# Altium footprint library WR-SMA.PcbLib: 59 footprints (part 2 of 4)
Each footprint in its own frame and in the unit in brackets; x right, y up, seen from the top. Pads: shape width x height; smd on the part's side, far side on the other; paste and mask are expansions set on the pad; w line width, h text height; cw(c..) or ccw(c..) is an arc to the next point about the centre after c.
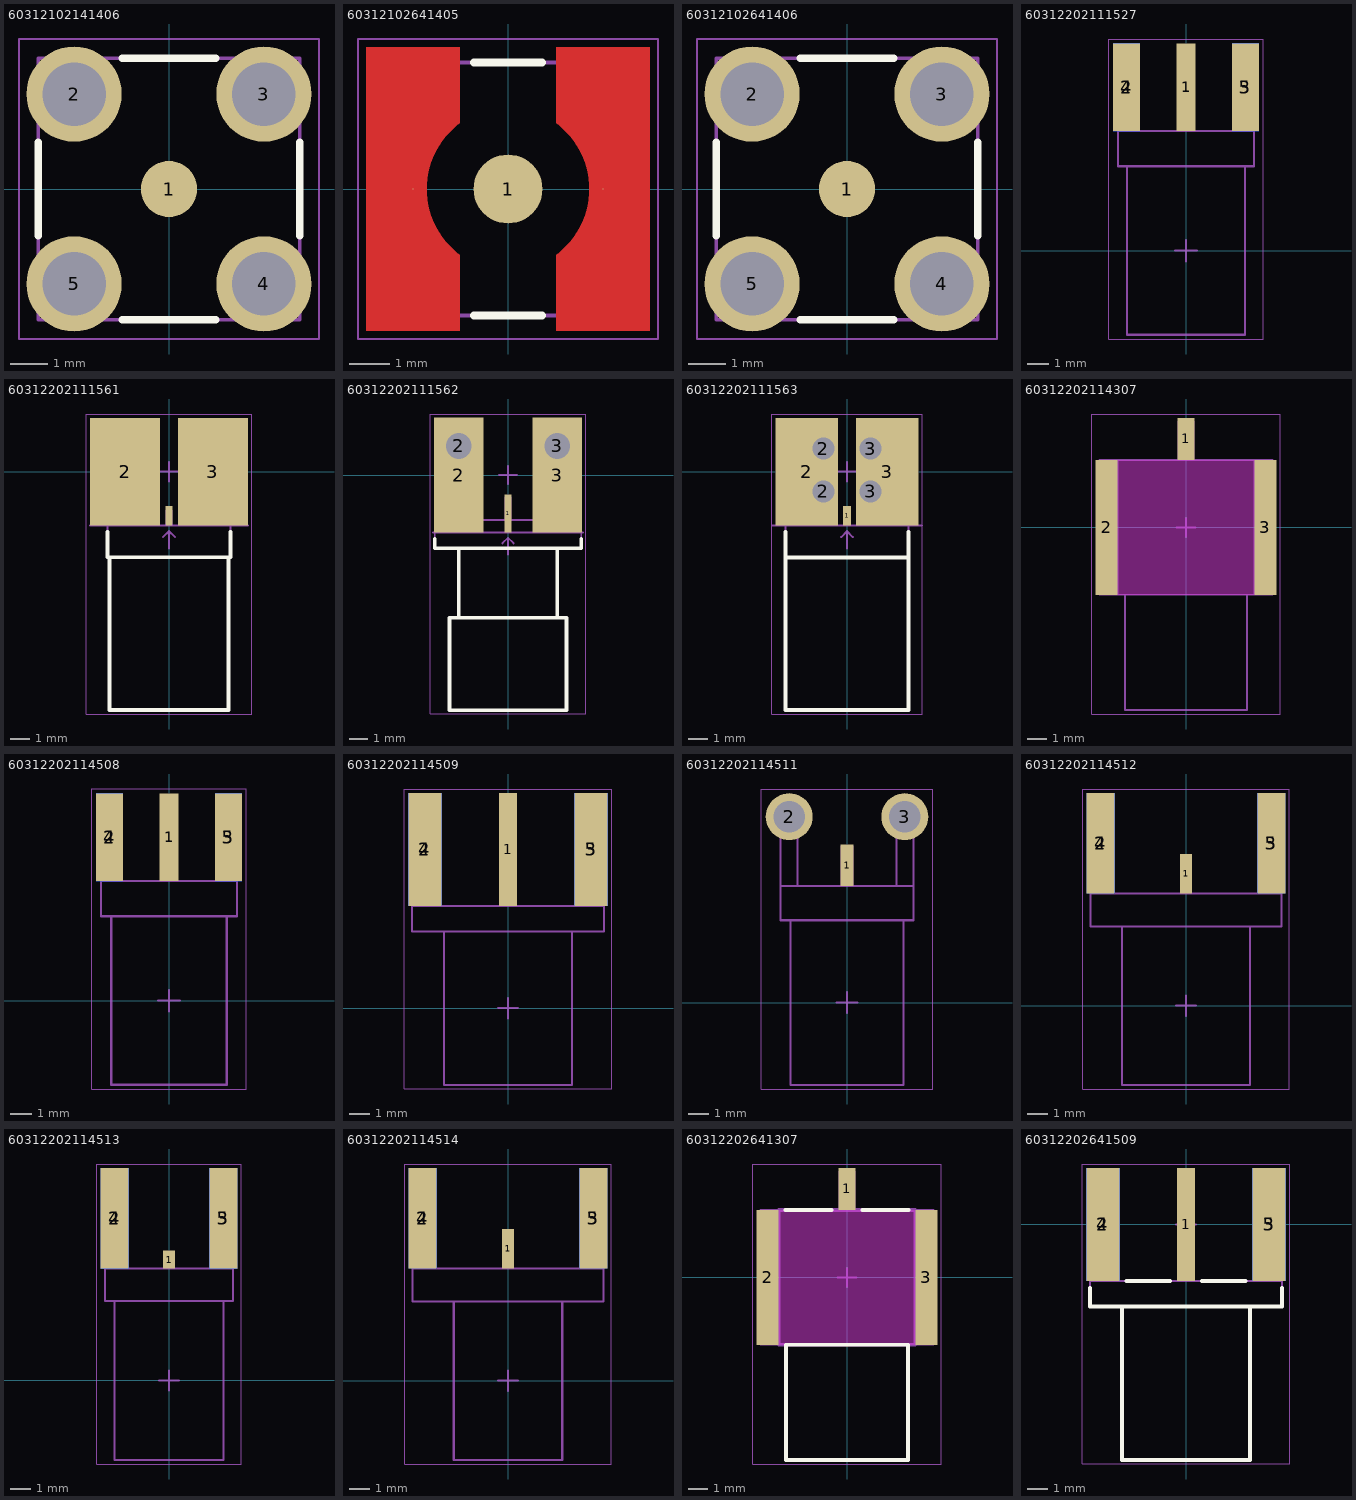
[diagram p1: the footprints below, top view; thin cyan lines are the x and y axes]

## 60312102141406 [mm] "SMA PCB SMT Jack Straight with  THT Grounding Pins"
height 9.56
pads (5):
  round 1.5 smd: 1(0,0)
  round 2.55 hole 1.7: 2(-2.54,2.54) 3(2.54,2.54) 4(2.54,-2.54) 5(-2.54,-2.54)
Top Overlay:
  lines w0.2: -3.5,-1.25 -3.5,1.25 ; -1.25,-3.5 1.25,-3.5 ; -1.25,3.5 1.25,3.5 ; 3.5,-1.25 3.5,1.25
Top Assembly:
  lines w0.1: -3.5,-3.5 -3.5,3.5 3.5,3.5 3.5,-3.5 -3.5,-3.5
Top Designator:
  text ".Designator" at -3.647,-0.357 h1
Top 3D Body:
  lines w0.1: -3.5,-3.5 -3.5,3.5 3.5,3.5 3.5,-3.5 -3.5,-3.5
Top Courtyard:
  lines w0.05: -4.015,-4.015 4.015,-4.015 4.015,4.015 -4.015,4.015 -4.015,-4.015
Top Component Center:
  lines w0.1: -0.5,0 0.5,0 ; 0,-0.5 0,0.5
3D body "60312102141406.stp": height 9.66, standoff -1.8, extent -3.433,-3.5 3.567,3.5

## 60312102641405 [mm] "SMA PCB SMT Jack Straight"
height 8.84
pads (3):
  round 1.73 smd: 1(0,0)
  round 0.025 smd: 2(-2.38,0) 3(2.38,0)
Top Layer:
  region: -3.555,-3.555 -3.555,3.555 -1.205,3.555 -1.205,1.652 -1.281,1.594 -1.425,1.466 -1.557,1.326 -1.674,1.174 -1.777,1.011 -1.865,0.84 -1.935,0.661 -1.989,0.476 -2.025,0.288 -2.043,0.096 -2.043,-0.096 -2.025,-0.288 -1.989,-0.476 -1.935,-0.661 -1.865,-0.84 -1.777,-1.011 -1.674,-1.174 -1.557,-1.326 -1.425,-1.466 -1.281,-1.594 -1.205,-1.652 -1.205,-3.555
  region: 3.555,-3.555 3.555,3.555 1.205,3.555 1.205,1.652 1.281,1.594 1.425,1.466 1.557,1.326 1.674,1.174 1.777,1.011 1.865,0.84 1.935,0.661 1.989,0.476 2.025,0.288 2.043,0.096 2.043,-0.096 2.025,-0.288 1.989,-0.476 1.935,-0.661 1.865,-0.84 1.777,-1.011 1.674,-1.174 1.557,-1.326 1.425,-1.466 1.281,-1.594 1.205,-1.652 1.205,-3.555
Top Overlay:
  lines w0.2: -0.85,-3.175 0.85,-3.175 ; -0.85,3.175 0.85,3.175
Top Assembly:
  lines w0.1: -3.175,-3.175 -3.175,3.175 3.175,3.175 3.175,-3.175 -3.175,-3.175
Top Designator:
  text ".Designator" at -3.647,-0.357 h1
Top 3D Body:
  lines w0.1: -3.175,-3.175 -3.175,3.175 3.175,3.175 3.175,-3.175 -3.175,-3.175
Top Courtyard:
  lines w0.05: -3.755,-3.76 -3.755,3.76 3.755,3.76 3.755,-3.76 -3.755,-3.76
Top Component Center:
  lines w0.1: -0.5,0 0.5,0 ; 0,-0.5 0,0.5
3D body "60312102641405.stp": height 8.89, standoff 0.05, extent -3.175,-3.175 3.175,3.175

## 60312102641406 [mm] "SMA PCB SMT Jack Straight with  THT Grounding Pins"
height 9.56
pads (5):
  round 1.5 smd: 1(0,0)
  round 2.55 hole 1.7: 2(-2.54,2.54) 3(2.54,2.54) 4(2.54,-2.54) 5(-2.54,-2.54)
Top Overlay:
  lines w0.2: -3.5,-1.25 -3.5,1.25 ; -1.25,-3.5 1.25,-3.5 ; -1.25,3.5 1.25,3.5 ; 3.5,-1.25 3.5,1.25
Top Assembly:
  lines w0.1: -3.5,-3.5 3.5,-3.5 3.5,3.5 -3.5,3.5 -3.5,-3.5
Top Designator:
  text ".Designator" at -3.647,-0.357 h1
Top 3D Body:
  lines w0.1: -3.5,-3.5 3.5,-3.5 3.5,3.5 -3.5,3.5 -3.5,-3.5
Top Courtyard:
  lines w0.05: -4.015,-4.015 -4.015,4.015 4.015,4.015 4.015,-4.015 -4.015,-4.015
Top Component Center:
  lines w0.1: -0.5,0 0.5,0 ; 0,-0.5 0,0.5
3D body "60312102641406.stp": height 9.61, standoff -1.85, extent -3.433,-3.5 3.567,3.5

## 60312202111527 [mm] "SMA PCB End Launch  Jack"
height 3.175
pads (5):
  rect 0.9x4.1 smd: 1(0,7.635)
  rect 1.25x4.1 smd: 2(-2.775,7.635) 3(2.775,7.635)
  rect 1.25x4.1 smd far side: 4(-2.775,7.635) 5(2.775,7.635)
Assembly Notes:
  lines w0.1: -3.175,5.585 3.175,5.585
  text "PCB END" at -2.2,4.335 h0.76
Top Assembly:
  lines w0.1: -2.75,3.935 -2.75,-3.935 2.75,-3.935 2.75,3.935 ; -3.175,3.935 -3.175,9.395 -2.365,9.395 -2.365,5.585 -0.38,5.585 -0.38,9.395 0.38,9.395 0.38,5.585 2.365,5.585 2.365,9.395 3.175,9.395 3.175,3.935 -3.175,3.935
Top Designator:
  text ".Designator" at -3.647,-0.357 h1
Top Courtyard:
  lines w0.05: -3.6,-4.135 -3.6,9.885 3.6,9.885 3.6,-4.135 -3.6,-4.135
Top Component Center:
  lines w0.1: -0.5,0 0.5,0 ; 0,-0.5 0,0.5
3D body "60312202111527.stp": height 3.55, standoff -2.8, extent -3.175,-3.935 3.175,9.395

## 60312202111561 [mm] "SMA Edgecard Mount Jack"
height 6.35
pads (3):
  rect 0.35x1 smd: 1(0,-2.27)
  rect 3.61x5.54 smd: 2(-2.26,0) 3(2.26,0)
Top Overlay:
  lines w0.2: -3.175,-3.1 -3.175,-4.42 3.175,-4.42 3.175,-3.1 ; -3.068,-4.42 -3.068,-12.3 3.068,-12.3 3.068,-4.42
Assembly Notes:
  lines w0.1: -4.065,-2.77 4.065,-2.77 ; -0.3,-3.37 0,-3.07 ; 0,-3.97 0,-3.07 ; 0.3,-3.37 0,-3.07
  text "PCB End" at -2.952,-5.07 h1
Top Assembly:
  lines w0.1: -3.175,-2.77 3.175,-2.77 ; -3.068,-4.42 -3.068,-12.3 3.068,-12.3 3.068,-4.42 ; -0.635,-2.77 -0.635,1.78 -3.175,1.78 -3.175,-4.42 3.175,-4.42 3.175,1.78 0.635,1.78 0.635,-2.77 ; -0.125,-2.77 -0.125,-2.01 0.125,-2.01 0.125,-2.77
Top Designator:
  text ".Designator" at -3.647,-0.357 h1
Top 3D Body:
  lines w0.1: -3.175,-2.77 3.175,-2.77 ; -3.068,-4.42 -3.068,-12.3 3.068,-12.3 3.068,-4.42 ; -0.635,-2.77 -0.635,1.78 -3.175,1.78 -3.175,-4.42 3.175,-4.42 3.175,1.78 0.635,1.78 0.635,-2.77 ; -0.125,-2.77 -0.125,-2.01 0.125,-2.01 0.125,-2.77
Top Courtyard:
  lines w0.05: -4.265,-12.5 -4.265,2.97 4.265,2.97 4.265,-12.5 -4.265,-12.5
Top Component Center:
  lines w0.1: -0.5,0 0.5,0 ; 0,-0.5 0,0.5
3D body "60312202111561.stp": height 3.29, standoff -3.06, extent -3.175,-12.3 3.175,1.78

## 60312202111562 [mm] "SAM Fixtureless Snap-in Edge Launch Jack"
height 8.73
pads (5):
  rect 0.4x2.05 smd: 1(0,-2.075)
  rect 2.69x6.2 smd: 2(-2.665,0) 3(2.665,0)
  round 2 hole 1.39: 2(-2.665,1.57) 3(2.665,1.57)
Top Overlay:
  lines w0.2: -3.96,-3.46 -3.96,-3.96 3.96,-3.96 3.96,-3.46 ; -2.66,-7.72 -2.66,-3.96 ; 2.66,-7.72 2.66,-3.96 ; -3.165,-12.72 3.165,-12.72 3.165,-7.72 -3.165,-7.72 -3.165,-12.72
Assembly Notes:
  lines w0.1: -4.065,-3.1 4.065,-3.1 ; -0.3,-3.7 0,-3.4 ; 0,-4.3 0,-3.4 ; 0.3,-3.7 0,-3.4
  text "PCB End" at -2.952,-5.4 h1
Top Assembly:
  lines w0.1: -2.66,-7.72 -2.66,-3.96 ; 2.66,-7.72 2.66,-3.96 ; -3.96,-3.96 -3.96,3.03 -1.58,3.03 -1.58,-2.44 -0.15,-2.44 -0.15,-1.17 0.15,-1.17 0.15,-2.44 1.58,-2.44 1.58,3.03 3.96,3.03 3.96,-3.96 -3.96,-3.96 ; -3.165,-12.72 -3.165,-7.72 3.165,-7.72 3.165,-12.72 -3.165,-12.72
Top Designator:
  text ".Designator" at -3.647,-0.357 h1
Top 3D Body:
  lines w0.1: -2.66,-7.72 -2.66,-3.96 ; 2.66,-7.72 2.66,-3.96 ; -3.96,-3.96 3.96,-3.96 3.96,3.03 1.58,3.03 1.58,-2.44 0.15,-2.44 0.15,-1.17 -0.15,-1.17 -0.15,-2.44 -1.58,-2.44 -1.58,3.03 -3.96,3.03 -3.96,-3.96 ; -3.165,-12.72 3.165,-12.72 3.165,-7.72 -3.165,-7.72 -3.165,-12.72
Top Courtyard:
  lines w0.05: -4.21,-12.92 -4.21,3.3 4.21,3.3 4.21,-12.92 -4.21,-12.92
Top Component Center:
  lines w0.1: -0.5,0 0.5,0 ; 0,-0.5 0,0.5
3D body "60312202111562.stp": height 4.48, standoff -4.24, extent -3.96,-12.72 3.96,3.03

## 60312202111563 [mm] "SMA END Launch Jack"
height 6.35
pads (7):
  rect 0.41x1 smd: 1(0,-2.27)
  rect 3.22x5.54 smd: 2(-2.065,0) 3(2.065,0)
  round 1.5 hole 1.14: 2(-1.22,-1.02) 2(-1.22,1.19) 3(1.22,-1.02) 3(1.22,1.19)
Top Overlay:
  lines w0.2: -3.175,-3.12 -3.175,-4.42 3.175,-4.42 3.175,-3.12 ; -3.165,-4.42 -3.165,-12.29 3.165,-12.29 3.165,-4.42
Assembly Notes:
  lines w0.1: -3.875,-2.77 3.875,-2.77 ; -0.3,-3.37 0,-3.07 ; 0,-3.97 0,-3.07 ; 0.3,-3.37 0,-3.07
  text "PCB End" at -2.952,-5.07 h1
Top Assembly:
  lines w0.1: -3.175,-2.77 3.175,-2.77 ; -3.165,-4.42 -3.165,-12.29 3.165,-12.29 3.165,-4.42 ; -0.635,-2.77 -0.635,1.78 -3.175,1.78 -3.175,-4.42 3.175,-4.42 3.175,1.78 0.635,1.78 0.635,-2.77 ; -0.125,-2.77 -0.125,-2.01 0.125,-2.01 0.125,-2.77
Top Designator:
  text ".Designator" at -3.647,-0.357 h1
Top 3D Body:
  lines w0.1: -3.175,-2.77 3.175,-2.77 ; -3.165,-4.42 -3.165,-12.29 3.165,-12.29 3.165,-4.42 ; -0.635,-2.77 -0.635,1.78 -3.175,1.78 -3.175,-4.42 3.175,-4.42 3.175,1.78 0.635,1.78 0.635,-2.77 ; -0.125,-2.77 -0.125,-2.01 0.125,-2.01 0.125,-2.77
Top Courtyard:
  lines w0.05: -3.875,-12.49 -3.875,2.97 3.875,2.97 3.875,-12.49 -3.875,-12.49
Top Component Center:
  lines w0.1: -0.5,0 0.5,0 ; 0,-0.5 0,0.5
3D body "60312202111563.stp": height 3.29, standoff -3.06, extent -3.175,-12.29 3.175,1.78

## 60312202114307 [mm] "SMA PCB End Launch Jack SMT  Edge Card for 1.6mm PCB"
height 4
pads (3):
  rect 0.9x2.2 smd: 1(0,4.6)
  rect 1.15x7 smd: 2(-4.125,0) 3(4.125,0)
Keep-Out Layer:
  board cut-out: -3.55,-3.5 -3.55,3.5 3.55,3.5 3.55,-3.5
Assembly Notes:
  lines w0.1: -3.55,-3.5 3.55,-3.5 3.55,3.5 -3.55,3.5 -3.55,-3.5
  text "PCB End" at -1.7,-4.2 h0.8
  text "PCB Cutout Area" at -2.7,-0.2 h0.8
  text "PCB Thickness 1.6m max." at -4,-10.2 h0.8
Top Assembly:
  lines w0.1: -4.5,-3.5 -3.175,-3.5 -3.175,-9.5 3.175,-9.5 3.175,-3.5 4.5,-3.5 4.5,3.5 0.38,3.5 0.38,5.5 -0.38,5.5 -0.38,3.5 -4.5,3.5 -4.5,-3.5
Top Designator:
  text ".Designator" at -3.647,-0.357 h1
Top Courtyard:
  lines w0.05: -4.9,-9.7 -4.9,5.9 4.9,5.9 4.9,-9.7 -4.9,-9.7
Top Component Center:
  lines w0.1: -0.5,0 0.5,0 ; 0,-0.5 0,0.5
3D body "60312202114307.stp": height 4, standoff -3, extent -4.5,-9.5 4.5,5.5

## 60312202114508 [mm] "SMA PCB End Launch Jack Round  Post for 1.1mm PCB"
height 6.35
pads (5):
  rect 0.9x4.1 smd: 1(0,7.635)
  rect 1.25x4.1 smd: 2(-2.775,7.635) 3(2.775,7.635)
  rect 1.25x4.1 smd far side: 4(-2.775,7.635) 5(2.775,7.635)
Assembly Notes:
  lines w0.1: -3.175,5.585 3.175,5.585
  text "PCB End" at -1.5,4.835 h0.8
  text "PCB Thickness 1.1mm" at -3.4,-4.765 h0.8
Top Assembly:
  lines w0.1: -2.7,3.935 -2.7,-3.935 2.7,-3.935 2.7,3.935 ; -3.175,3.935 3.175,3.935 3.175,9.395 2.365,9.395 2.365,5.585 0.38,5.585 0.38,9.395 -0.38,9.395 -0.38,5.585 -2.365,5.585 -2.365,9.395 -3.175,9.395 -3.175,3.935
Top Designator:
  text ".Designator" at -3.647,-0.357 h1
Top Courtyard:
  lines w0.05: -3.6,-4.135 3.6,-4.135 3.6,9.885 -3.6,9.885 -3.6,-4.135
Top Component Center:
  lines w0.1: -0.5,0 0.5,0 ; 0,-0.5 0,0.5
3D body "60312202114508.stp": height 3.57, standoff -2.78, extent -3.175,-3.935 3.175,9.395

## 60312202114509 [mm] "SMA PCB End Launch Jack Round  Post for 1.6mm PCB"
height 7.92
pads (5):
  rect 0.9x5.6 smd: 1(0,7.88)
  rect 1.65x5.6 smd: 2(-4.125,7.88) 3(4.125,7.88)
  rect 1.65x5.6 smd far side: 4(-4.125,7.88) 5(4.125,7.88)
Assembly Notes:
  lines w0.1: -4.76,5.08 4.76,5.08
  text "PCB End" at -1.5,4.38 h0.8
  text "PCB Thickness 1.6mm" at -3.4,-4.52 h0.8
Top Assembly:
  lines w0.1: -3.175,3.81 -3.175,-3.81 3.175,-3.81 3.175,3.81 ; -4.76,3.81 4.76,3.81 4.76,10.46 3.49,10.46 3.49,5.08 0.38,5.08 0.38,10.46 -0.38,10.46 -0.38,5.08 -3.49,5.08 -3.49,10.46 -4.76,10.46 -4.76,3.81
Top Designator:
  text ".Designator" at -3.647,-0.357 h1
Top Courtyard:
  lines w0.05: -5.15,-4.01 5.15,-4.01 5.15,10.88 -5.15,10.88 -5.15,-4.01
Top Component Center:
  lines w0.1: -0.5,0 0.5,0 ; 0,-0.5 0,0.5
3D body "60312202114509.stp": height 4.36, standoff -3.56, extent -4.76,-3.81 4.76,10.46

## 60312202114511 [mm] "SMA PCB End Launch Jack Flat Tab  with THT Grounding Pins for 2.8mm  Max. PCB"
height 6.35
pads (3):
  rect 0.61x1.97 smd: 1(0,6.575)
  round 2.25 hole 1.52: 2(-2.77,8.9) 3(2.77,8.9)
Assembly Notes:
  lines w0.1: -3.175,5.59 3.175,5.59
  text "PCB Thickness 2.8mm max." at -4.2,-4.71 h0.8
  text "PCB End" at -1.4,4.89 h0.8
Top Assembly:
  lines w0.1: -2.7,3.94 -2.7,-3.94 2.7,-3.94 2.7,3.94 ; -3.175,3.94 -3.175,9.4 -2.365,9.4 -2.365,5.59 -0.255,5.59 -0.255,7.49 0.255,7.49 0.255,5.59 2.365,5.59 2.365,9.4 3.175,9.4 3.175,3.94 -3.175,3.94
Top Designator:
  text ".Designator" at -3.647,-0.357 h1
Top Courtyard:
  lines w0.05: -4.095,-4.14 -4.095,10.225 4.095,10.225 4.095,-4.14 -4.095,-4.14
Top Component Center:
  lines w0.1: -0.5,0 0.5,0 ; 0,-0.5 0,0.5
3D body "60312202114511.stp": height 3.32, standoff -3.03, extent -3.175,-3.94 3.175,9.4

## 60312202114512 [mm] "SMA PCB End Launch Jack Flat  Tab for 1.1mm PCB"
height 7.92
pads (5):
  rect 0.61x1.97 smd: 1(0,6.57)
  rect 1.4x5 smd: 2(-4.25,8.085) 3(4.25,8.085)
  rect 1.4x5 smd far side: 4(-4.25,8.085) 5(4.25,8.085)
Assembly Notes:
  lines w0.1: -4.76,5.585 4.76,5.585
  text "PCB Thickness 1.1mm" at -3.7,-4.615 h0.8
  text "PCB End" at -1.5,4.885 h0.8
Top Assembly:
  lines w0.1: -3.175,3.945 -3.175,-3.945 3.175,-3.945 3.175,3.945 ; -4.76,3.945 4.76,3.945 4.76,10.345 3.74,10.345 3.74,5.585 0.255,5.585 0.255,7.485 -0.255,7.485 -0.255,5.585 -3.74,5.585 -3.74,10.345 -4.76,10.345 -4.76,3.945
Top Designator:
  text ".Designator" at -3.647,-0.357 h1
Top Courtyard:
  lines w0.05: -5.15,-4.145 5.15,-4.145 5.15,10.785 -5.15,10.785 -5.15,-4.145
Top Component Center:
  lines w0.1: -0.5,0 0.5,0 ; 0,-0.5 0,0.5
3D body "60312202114512.stp": height 4.11, standoff -3.82, extent -4.76,-3.945 4.76,10.345

## 60312202114513 [mm] "SMA PCB End Launch Jack Flat Tab  6.35SQ Flange for 1.6mm PCB"
height 6.35
pads (5):
  rect 0.61x0.9 smd: 1(0,6)
  rect 1.4x5 smd: 2(-2.7,8.05) 3(2.7,8.05)
  rect 1.4x5 smd far side: 4(-2.7,8.05) 5(2.7,8.05)
Assembly Notes:
  lines w0.1: -3.175,5.55 3.175,5.55
  text "PCB End" at -1.4,4.85 h0.8
  text "PCB Thickness 1.6mm" at -3.6,-4.65 h0.8
Top Assembly:
  lines w0.1: -2.7,3.95 -2.7,-3.95 2.7,-3.95 2.7,3.95 ; -3.175,3.95 3.175,3.95 3.175,10.25 2.175,10.25 2.175,5.55 0.255,5.55 0.255,6.35 -0.255,6.35 -0.255,5.55 -2.175,5.55 -2.175,10.25 -3.175,10.25 -3.175,3.95
Top Designator:
  text ".Designator" at -3.647,-0.357 h1
Top Courtyard:
  lines w0.05: -3.6,-4.15 3.6,-4.15 3.6,10.75 -3.6,10.75 -3.6,-4.15
Top Component Center:
  lines w0.1: -0.5,0 0.5,0 ; 0,-0.5 0,0.5
3D body "60312202114513.stp": height 3.34, standoff -3.01, extent -3.175,-3.95 3.175,10.25

## 60312202114514 [mm] "SMA PCB End Launch Jack Flat  Tab for 1.6mm PCB"
height 7.92
pads (5):
  rect 0.61x1.97 smd: 1(0,6.57)
  rect 1.4x5 smd: 2(-4.25,8.085) 3(4.25,8.085)
  rect 1.4x5 smd far side: 4(-4.25,8.085) 5(4.25,8.085)
Assembly Notes:
  lines w0.1: -4.76,5.585 4.76,5.585
  text "PCB End" at -1.5,4.885 h0.8
  text "PCB Thickness 1.6mm" at -3.7,-4.615 h0.8
Top Assembly:
  lines w0.1: -2.7,3.945 -2.7,-3.945 2.7,-3.945 2.7,3.945 ; -4.76,3.945 4.76,3.945 4.76,10.345 3.74,10.345 3.74,5.585 0.255,5.585 0.255,7.485 -0.255,7.485 -0.255,5.585 -3.74,5.585 -3.74,10.345 -4.76,10.345 -4.76,3.945
Top Designator:
  text ".Designator" at -3.647,-0.357 h1
Top Courtyard:
  lines w0.05: -5.15,-4.145 -5.15,10.785 5.15,10.785 5.15,-4.145 -5.15,-4.145
Top Component Center:
  lines w0.1: -0.5,0 0.5,0 ; 0,-0.5 0,0.5
3D body "60312202114514.stp": height 4.08, standoff -3.85, extent -4.76,-3.945 4.76,10.345

## 60312202641307 [mm] "SMA PCB End Launch Jack SMT  Edge Card for 1.6mm PCB"
height 4
pads (3):
  rect 0.9x2.2 smd: 1(0,4.6)
  rect 1.15x7 smd: 2(-4.125,0) 3(4.125,0)
Top Overlay:
  lines w0.2: -3.2,3.5 -0.8,3.5 ; 0.8,3.5 3.2,3.5 ; -3.175,-9.5 -3.175,-3.5 3.175,-3.5 3.175,-9.5 -3.175,-9.5
Keep-Out Layer:
  board cut-out: -3.55,-3.5 -3.55,3.5 3.55,3.5 3.55,-3.5
Board Shape:
  lines w0.2: -3.55,-3.5 -3.55,3.5 3.55,3.5 3.55,-3.5 -3.55,-3.5
  text "PCB Cutout Area" at -2.7,-0.2 h0.8
Assembly Notes:
  lines w0.1: -3.55,-3.5 3.55,-3.5 3.55,3.5 -3.55,3.5 -3.55,-3.5
  text "PCB End" at -1.7,-4.2 h0.8
  text "PCB Thickness 1.6m max." at -4,-10.2 h0.8
Top Assembly:
  lines w0.1: -3.175,-3.5 -3.175,-9.5 3.175,-9.5 3.175,-3.5 ; -0.38,3.5 -0.38,5.5 0.38,5.5 0.38,3.5 ; -4.5,-3.5 4.5,-3.5 4.5,3.5 -4.5,3.5 -4.5,-3.5
Top Designator:
  text ".Designator" at -3.647,-0.357 h1
Top 3D Body:
  lines w0.1: -3.175,-3.5 -3.175,-9.5 3.175,-9.5 3.175,-3.5 ; -0.38,3.5 -0.38,5.5 0.38,5.5 0.38,3.5 ; -4.5,-3.5 4.5,-3.5 4.5,3.5 -4.5,3.5 -4.5,-3.5
Top Courtyard:
  lines w0.05: -4.9,-9.7 -4.9,5.9 4.9,5.9 4.9,-9.7 -4.9,-9.7
Top Component Center:
  lines w0.1: -0.5,0 0.5,0 ; 0,-0.5 0,0.5
3D body "60312202641307.stp": height 4.05, standoff -2.95, extent -4.5,-9.5 4.5,5.5

## 60312202641509 [mm] "SMA PCB End Launch Jack Round  Post for 1.6mm PCB"
height 7.92
pads (5):
  rect 0.9x5.6 smd: 1(0,0)
  rect 1.65x5.6 smd: 2(-4.125,0) 3(4.125,0)
  rect 1.65x5.6 smd far side: 4(-4.125,0) 5(4.125,0)
Top Overlay:
  lines w0.2: -4.76,-3.15 -4.76,-4.07 4.76,-4.07 4.76,-3.15 ; -3.175,-4.07 -3.175,-11.69 3.175,-11.69 3.175,-4.07 ; -2.95,-2.8 -0.8,-2.8 ; 0.8,-2.8 2.95,-2.8
Assembly Notes:
  lines w0.1: -4.76,-2.8 4.76,-2.8
  text "PCB Thickness 1.6mm" at -3.4,-12.4 h0.8
  text "PCB End" at -1.5,-3.5 h0.8
Top Assembly:
  lines w0.1: -4.76,-2.8 4.76,-2.8 ; -3.49,-2.8 -3.49,2.58 -4.76,2.58 -4.76,-4.07 4.76,-4.07 4.76,2.58 ; -3.175,-4.07 -3.175,-11.69 3.175,-11.69 3.175,-4.07 ; -0.38,-2.8 -0.38,2.58 0.38,2.58 0.38,-2.8 ; 3.49,-2.8 3.49,2.58 ; 3.49,2.58 4.76,2.58
Top Designator:
  text ".Designator" at -3.647,-0.357 h1
Top 3D Body:
  lines w0.1: -4.76,-2.8 4.76,-2.8 ; -3.49,-2.8 -3.49,2.58 -4.76,2.58 -4.76,-4.07 4.76,-4.07 4.76,2.58 ; -3.175,-4.07 -3.175,-11.69 3.175,-11.69 3.175,-4.07 ; -0.38,-2.8 -0.38,2.58 0.38,2.58 0.38,-2.8 ; 3.49,-2.8 3.49,2.58 ; 3.49,2.58 4.76,2.58
Top Courtyard:
  lines w0.05: -5.15,-11.89 -5.15,3 5.15,3 5.15,-11.89 -5.15,-11.89
Top Component Center:
  lines w0.1: -0.5,0 0.5,0 ; 0,-0.5 0,0.5
3D body "60312202641509.stp": height 4.36, standoff -3.56, extent -4.76,-11.69 4.76,2.58